# Altium footprint library MainController.PcbLib: 68 footprints (part 4 of 5)
Each footprint in its own frame and in the unit in brackets; x right, y up, seen from the top. Pads: shape width x height; smd on the part's side, far side on the other; paste and mask are expansions set on the pad; w line width, h text height; cw(c..) or ccw(c..) is an arc to the next point about the centre after c.
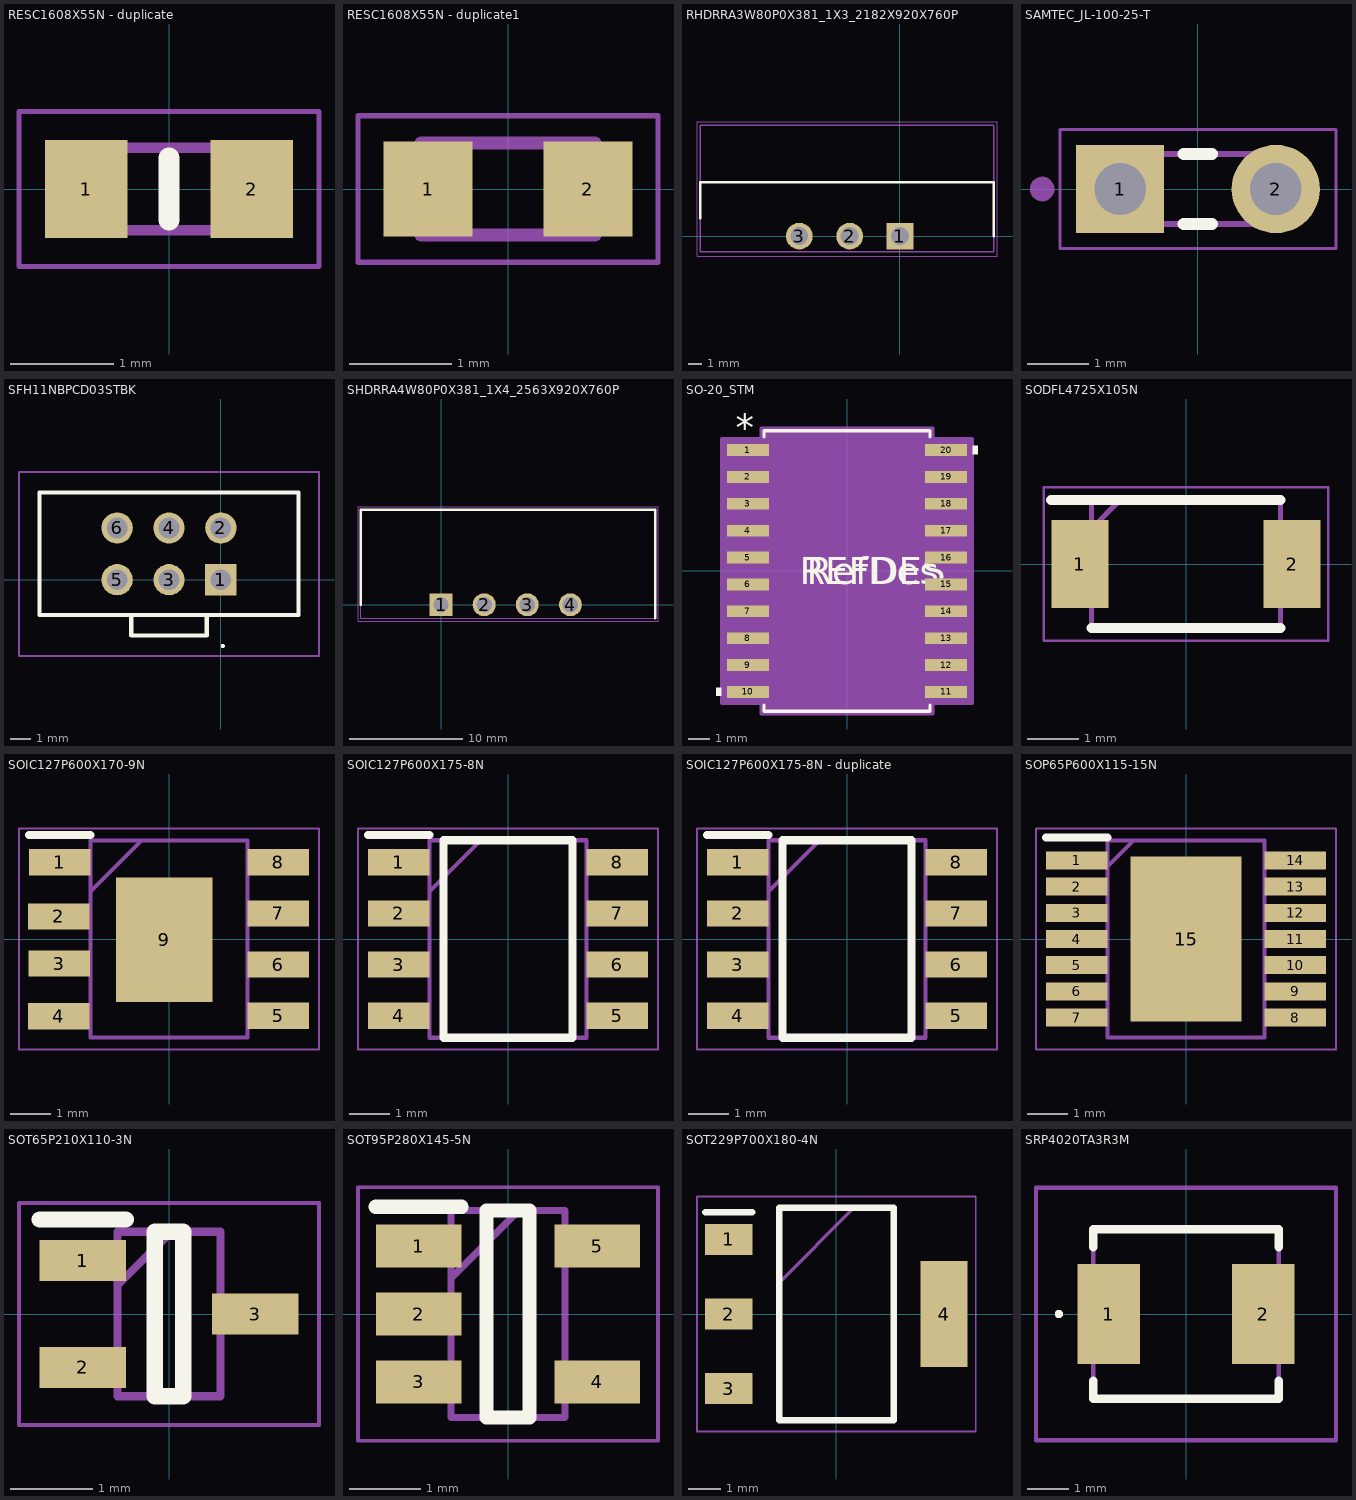
[diagram p3: the footprints below, top view; thin cyan lines are the x and y axes]

## RESC1608X55N - duplicate [mm]
pads (2):
  rect 0.8x0.95 smd: 1(-0.8,0) 2(0.8,0)
Top Overlay:
  lines w0.2: 0,-0.3 0,0.3
Mechanical 13:
  lines w0.1: -0.8,-0.4 -0.8,0.4 0.8,0.4 0.8,-0.4 -0.8,-0.4
Mechanical 15:
  lines w0.05: -1.45,-0.75 -1.45,0.75 1.45,0.75 1.45,-0.75 -1.45,-0.75
3D body "RC0603FR-075K1L.stp": height 0.46, standoff 0, extent -0.8,-0.4 0.8,0.4

## RESC1608X55N - duplicate1 [mm]
pads (2):
  rect 0.87x0.93 smd: 1(-0.78,0) 2(0.78,0)
Mechanical 13:
  lines w0.127: -0.85,-0.45 -0.85,0.45 0.85,0.45 0.85,-0.45 -0.85,-0.45
Mechanical 15:
  lines w0.05: -1.465,-0.715 -1.465,0.715 1.465,0.715 1.465,-0.715 -1.465,-0.715
3D body "step_temp.STEP": height 0.55, standoff 0, extent -0.8,-0.4 0.8,0.4

## RHDRRA3W80P0X381_1X3_2182X920X760P [mm]
pads (3):
  rect 2.025x2.025 hole 1.35: 1(0,0)
  round 2.025 hole 1.35: 2(-3.81,0) 3(-7.62,0)
Top Overlay:
  lines w0.2: -15.12,1.362 -15.12,4.088 7.1,4.088 7.1,0
Mechanical 13:
  lines w0.1: -15.12,-1.2 7.1,-1.2 7.1,8.4 -15.12,8.4 -15.12,-1.2
Mechanical 15:
  lines w0.05: -15.37,-1.512 7.35,-1.512 7.35,8.65 -15.37,8.65 -15.37,-1.512
3D body "TBP02R1W-381-03BE.stp": height 7.2, standoff -3.5, extent -14.92,-1.03 6.9,8.17

## SAMTEC_JL-100-25-T [mm]
pads (2):
  rect 1.44x1.44 hole 0.84: 1(-1.27,0)
  round 1.44 hole 0.84: 2(1.27,0)
Top Overlay:
  lines w0.2: -0.23,-0.57 0.23,-0.57 ; -0.23,0.57 0.23,0.57
Mechanical 13:
  circle w0.2: c-2.54,0 r0.1
  circle w0.2: c-2.54,0 r0.1
  lines w0.1: -1.27,-0.57 1.27,-0.57 1.27,0.57 -1.27,0.57 -1.27,-0.57
Mechanical 15:
  lines w0.05: -2.25,-0.97 -2.25,0.97 2.25,0.97 2.25,-0.97 -2.25,-0.97

## SFH11NBPCD03STBK [mm]
pads (6):
  rect 1.53x1.53 hole 1.02: 1(0,0)
  round 1.53 hole 1.02: 2(0,2.54) 3(-2.54,0) 4(-2.54,2.54) 5(-5.08,0) 6(-5.08,2.54)
Top Overlay:
  lines w0.1: 0.1,-3.3 cw(c0.1,-3.25) 0.1,-3.2 cw(c0.1,-3.25) 0.1,-3.3
  lines w0.2: -4.39,-1.73 -4.39,-2.73 -0.69,-2.73 -0.69,-1.73 ; -8.89,-1.73 3.81,-1.73 3.81,4.27 -8.89,4.27 -8.89,-1.73
Mechanical 13:
  lines w0.1: -4.39,-1.73 -4.39,-2.73 -0.69,-2.73 -0.69,-1.73 ; -8.89,-1.73 3.81,-1.73 3.81,4.27 -8.89,4.27 -8.89,-1.73
Mechanical 15:
  lines w0.1: -9.89,-3.73 4.81,-3.73 4.81,5.27 -9.89,5.27 -9.89,-3.73

## SHDRRA4W80P0X381_1X4_2563X920X760P [mm]
pads (4):
  rect 2.025x2.025 / inner round 2.025 / far side rect 2.025x2.025 hole 1.35: 1(0,0)
  round 2.025 hole 1.35: 2(3.81,0) 3(7.62,0) 4(11.43,0)
Top Overlay:
  lines w0.2: -7.1,0 -7.1,8.4 18.93,8.4 18.93,-1.2
Mechanical 15:
  lines w0.1: -7.1,-1.2 -7.1,8.4 18.93,8.4 18.93,-1.2 -7.1,-1.2
Mechanical 20:
  lines w0.05: -7.35,-1.45 19.18,-1.45 19.18,8.65 -7.35,8.65 -7.35,-1.45
3D body "TBP02R1W-381-04BE.stp": height 7.65, standoff -3.05, extent -7.1,-1.27 18.53,7.93

## SO-20_STM [mil]
pads (20):
  rect 78x22 smd paste+0 mask+0: 1(-184.5,225) 2(-184.5,175) 3(-184.5,125) 4(-184.5,75) 5(-184.5,25) 6(-184.5,-25) 7(-184.5,-75) 8(-184.5,-125) 9(-184.5,-175) 10(-184.5,-225) 11(184.5,-225) 12(184.5,-175) 13(184.5,-125) 14(184.5,-75) 15(184.5,-25) 16(184.5,25) 17(184.5,75) 18(184.5,125) 19(184.5,175) 20(184.5,225)
Top Overlay:
  region: -233.5,-217.5 -243.5,-217.5 -243.5,-232.5 -233.5,-232.5
  region: 233.5,232.5 243.5,232.5 243.5,217.5 233.5,217.5
  lines w6: -154.5,-249.1 -154.5,-261 154.5,-261 154.5,-249.1 ; -154.5,249.1 -154.5,261 154.5,261 154.5,249.1
  text "*" at -207,242 h50
  text "RefDes" at -75,-25 h50
  text "REFDES" at -87.5,-25 h50
Mechanical 13:
  lines w0: -12,256 ccw(c0,256) 12,256
  lines w1: -209.5,-235 -209.5,-215 -149.5,-215 -149.5,-235 -209.5,-235 ; -209.5,-185 -209.5,-165 -149.5,-165 -149.5,-185 -209.5,-185 ; -209.5,-135 -209.5,-115 -149.5,-115 -149.5,-135 -209.5,-135 ; -209.5,-85 -209.5,-65 -149.5,-65 -149.5,-85 -209.5,-85 ; -209.5,-35 -209.5,-15 -149.5,-15 -149.5,-35 -209.5,-35 ; -209.5,15 -209.5,35 -149.5,35 -149.5,15 -209.5,15 ; -209.5,65 -209.5,85 -149.5,85 -149.5,65 -209.5,65 ; -209.5,115 -209.5,135 -149.5,135 -149.5,115 -209.5,115 ; -209.5,165 -209.5,185 -149.5,185 -149.5,165 -209.5,165 ; -209.5,215 -209.5,235 -149.5,235 -149.5,215 -209.5,215 ; -149.5,-256 149.5,-256 149.5,256 -149.5,256 -149.5,-256 ; 149.5,-235 149.5,-215 209.5,-215 209.5,-235 149.5,-235 ; 149.5,-185 149.5,-165 209.5,-165 209.5,-185 149.5,-185 ; 149.5,-135 149.5,-115 209.5,-115 209.5,-135 149.5,-135 ; 149.5,-85 149.5,-65 209.5,-65 209.5,-85 149.5,-85 ; 149.5,-35 149.5,-15 209.5,-15 209.5,-35 149.5,-35 ; 149.5,15 149.5,35 209.5,35 209.5,15 149.5,15 ; 149.5,65 149.5,85 209.5,85 209.5,65 149.5,65 ; 149.5,115 149.5,135 209.5,135 209.5,115 149.5,115 ; 149.5,165 149.5,185 209.5,185 209.5,165 149.5,165 ; 149.5,215 149.5,235 209.5,235 209.5,215 149.5,215
  text "*" at -147,203 h50
  text "RefDes2" at -87.5,-25 h50
Mechanical 15:
  region: -159.5,-246 -233.5,-246 -233.5,246 -159.5,246 -159.5,266 159.5,266 159.5,246 233.5,246 233.5,-246 159.5,-246 159.5,-266 -159.5,-266
  lines w6: -233.5,-246 -233.5,246 -159.5,246 -159.5,266 159.5,266 159.5,246 233.5,246 233.5,-246 159.5,-246 159.5,-266 -159.5,-266 -159.5,-246 -233.5,-246
3D body "SO-20_STM.step": height 104.09, standoff 0, extent -209.49,-255.98 209.49,255.98

## SODFL4725X105N [mm]
pads (2):
  rect 1.12x1.72 smd: 1(-2.075,0) 2(2.075,0)
Top Overlay:
  lines w0.2: -2.635,1.25 1.85,1.25 ; -1.85,-1.25 1.85,-1.25
Mechanical 13:
  lines w0.1: -1.85,0.69 -1.29,1.25 ; -1.85,-1.25 1.85,-1.25 1.85,1.25 -1.85,1.25 -1.85,-1.25
Mechanical 15:
  lines w0.05: -2.785,-1.5 2.785,-1.5 2.785,1.5 -2.785,1.5 -2.785,-1.5
3D body "RSX301LAM30TR.stp": height 0.95, standoff 0, extent -2.35,-1.25 2.35,1.25

## SOIC127P600X170-9N [mm]
pads (9):
  rect 1.525x0.65 smd: 1(-2.712,1.905) 2(-2.736,0.561) 3(-2.729,-0.609) 4(-2.743,-1.917) 5(2.712,-1.905) 6(2.712,-0.635) 7(2.712,0.635) 8(2.712,1.905)
  rect 2.4x3.1 smd: 9(-0.114,-0.017)
Top Overlay:
  lines w0.2: -3.475,2.58 -1.95,2.58
Mechanical 15:
  lines w0.1: -1.95,1.18 -0.68,2.45 ; -1.95,-2.45 -1.95,2.45 1.95,2.45 1.95,-2.45 -1.95,-2.45
Mechanical 20:
  lines w0.05: -3.725,-2.75 -3.725,2.75 3.725,2.75 3.725,-2.75 -3.725,-2.75
3D body "LMR38020FSQDDARQ1.stp": height 1.57, standoff 0, extent -3.114,-2.467 2.886,2.433

## SOIC127P600X175-8N [mm]
pads (8):
  rect 1.528x0.65 smd: 1(-2.711,1.905) 2(-2.711,0.635) 3(-2.711,-0.635) 4(-2.711,-1.905) 5(2.711,-1.905) 6(2.711,-0.635) 7(2.711,0.635) 8(2.711,1.905)
Top Overlay:
  lines w0.2: -3.475,2.58 -1.948,2.58 ; -1.598,-2.452 -1.598,2.452 1.598,2.452 1.598,-2.452 -1.598,-2.452
Mechanical 15:
  lines w0.1: -1.948,1.182 -0.678,2.452 ; -1.948,-2.452 -1.948,2.452 1.948,2.452 1.948,-2.452 -1.948,-2.452
Mechanical 20:
  lines w0.05: -3.725,-2.75 -3.725,2.75 3.725,2.75 3.725,-2.75 -3.725,-2.75
3D body "TCAN1044AVDRQ1.stp": height 1.63, standoff 0, extent -3.138,-2.451 2.884,2.451

## SOIC127P600X175-8N - duplicate [mm]
pads (8):
  rect 1.528x0.65 smd: 1(-2.711,1.905) 2(-2.711,0.635) 3(-2.711,-0.635) 4(-2.711,-1.905) 5(2.711,-1.905) 6(2.711,-0.635) 7(2.711,0.635) 8(2.711,1.905)
Top Overlay:
  lines w0.2: -3.475,2.58 -1.948,2.58 ; -1.598,-2.452 -1.598,2.452 1.598,2.452 1.598,-2.452 -1.598,-2.452
Mechanical 13:
  lines w0.1: -1.948,1.182 -0.678,2.452 ; -1.948,-2.452 -1.948,2.452 1.948,2.452 1.948,-2.452 -1.948,-2.452
Mechanical 15:
  lines w0.05: -3.725,-2.75 -3.725,2.75 3.725,2.75 3.725,-2.75 -3.725,-2.75
3D body "TCAN3403DRQ1.stp": height 1.75, standoff 0, extent -3,-2.45 3,2.45

## SOP65P600X115-15N [mm]
pads (15):
  rect 1.525x0.45 smd: 1(-2.712,1.95) 2(-2.712,1.3) 3(-2.712,0.65) 4(-2.712,0) 5(-2.712,-0.65) 6(-2.712,-1.3) 7(-2.712,-1.95) 8(2.712,-1.95) 9(2.712,-1.3) 10(2.712,-0.65) 11(2.712,0) 12(2.712,0.65) 13(2.712,1.3) 14(2.712,1.95)
  rect 2.75x4.1 smd: 15(0,0)
Top Overlay:
  lines w0.2: -3.475,2.525 -1.95,2.525
Mechanical 15:
  lines w0.1: -1.95,1.8 -1.3,2.45 ; -1.95,-2.45 -1.95,2.45 1.95,2.45 1.95,-2.45 -1.95,-2.45
Mechanical 20:
  lines w0.05: -3.725,-2.75 -3.725,2.75 3.725,2.75 3.725,-2.75 -3.725,-2.75
3D body "BTS70902EPLXUMA1.stp": height 1.18, standoff 0.04, extent -3.115,-2.415 2.885,2.485

## SOT65P210X110-3N [mm]
pads (3):
  rect 1.05x0.5 smd: 1(-1.05,0.65) 2(-1.05,-0.65) 3(1.05,0)
Top Overlay:
  lines w0.2: -1.575,1.15 -0.525,1.15 ; -0.175,-1 0.175,-1 0.175,1 -0.175,1 -0.175,-1
Mechanical 13:
  lines w0.1: -0.625,0.35 0.025,1 ; -0.625,-1 0.625,-1 0.625,1 -0.625,1 -0.625,-1
Mechanical 15:
  lines w0.05: -1.825,-1.35 1.825,-1.35 1.825,1.35 -1.825,1.35 -1.825,-1.35
3D body "ESDCAN03-2BWY.stp": height 1.1, standoff 0, extent -1.05,-1 1.05,1

## SOT95P280X145-5N [mm]
pads (5):
  rect 1.2x0.6 smd: 1(-1.25,0.95) 2(-1.25,0) 3(-1.25,-0.95) 4(1.25,-0.95) 5(1.25,0.95)
Top Overlay:
  lines w0.2: -1.85,1.5 -0.65,1.5 ; -0.3,-1.45 0.3,-1.45 0.3,1.45 -0.3,1.45 -0.3,-1.45
Mechanical 15:
  lines w0.1: -0.8,0.5 0.15,1.45 ; -0.8,-1.45 0.8,-1.45 0.8,1.45 -0.8,1.45 -0.8,-1.45
Mechanical 20:
  lines w0.05: -2.1,-1.775 2.1,-1.775 2.1,1.775 -2.1,1.775 -2.1,-1.775
3D body "TLV75533PDBVR.stp": height 1.19, standoff -0.01, extent -1.4,-1.45 1.4,1.45

## SOT229P700X180-4N [mm]
pads (4):
  rect 1.45x0.95 smd: 1(-3.3,2.29) 2(-3.3,0) 3(-3.3,-2.29)
  rect 1.45x3.25 smd: 4(3.3,0)
Top Overlay:
  lines w0.2: -4.025,3.115 -2.575,3.115 ; -1.752,-3.252 -1.752,3.252 1.752,3.252 1.752,-3.252 -1.752,-3.252
Mechanical 13:
  lines w0.1: -1.752,0.962 0.538,3.252 ; -1.752,-3.252 -1.752,3.252 1.752,3.252 1.752,-3.252 -1.752,-3.252
Mechanical 15:
  lines w0.05: -4.275,-3.605 -4.275,3.605 4.275,3.605 4.275,-3.605 -4.275,-3.605
3D body "AMS1117-3.3.stp": height 1.8, standoff 0, extent -3.355,-3.15 3.355,3.15

## SRP4020TA3R3M [mm]
pads (2):
  rect 1.5x2.4 smd: 1(-1.85,0) 2(1.85,0)
Top Overlay:
  lines w0.1: -3.1,0 ccw(c-3.05,0) -3,0 ccw(c-3.05,0) -3.1,0
  lines w0.2: -2.225,-1.6 -2.225,-2.03 2.225,-2.03 2.225,-1.6 ; -2.225,1.6 -2.225,2.03 2.225,2.03 2.225,1.6
Mechanical 13:
  lines w0.1: -2.225,-2.03 -2.225,2.03 2.225,2.03 2.225,-2.03 -2.225,-2.03
Mechanical 15:
  lines w0.1: -3.6,-3.03 -3.6,3.03 3.6,3.03 3.6,-3.03 -3.6,-3.03
3D body "SRP4020TA-3R3M.stp": height 1.77, standoff 0, extent -2.225,-2.03 2.225,2.03